# Altium footprint library Balancer.PcbLib: 11 footprints
Each footprint in its own frame and in the unit in brackets; x right, y up, seen from the top. Pads: shape width x height; smd on the part's side, far side on the other; paste and mask are expansions set on the pad; w line width, h text height; cw(c..) or ccw(c..) is an arc to the next point about the centre after c.
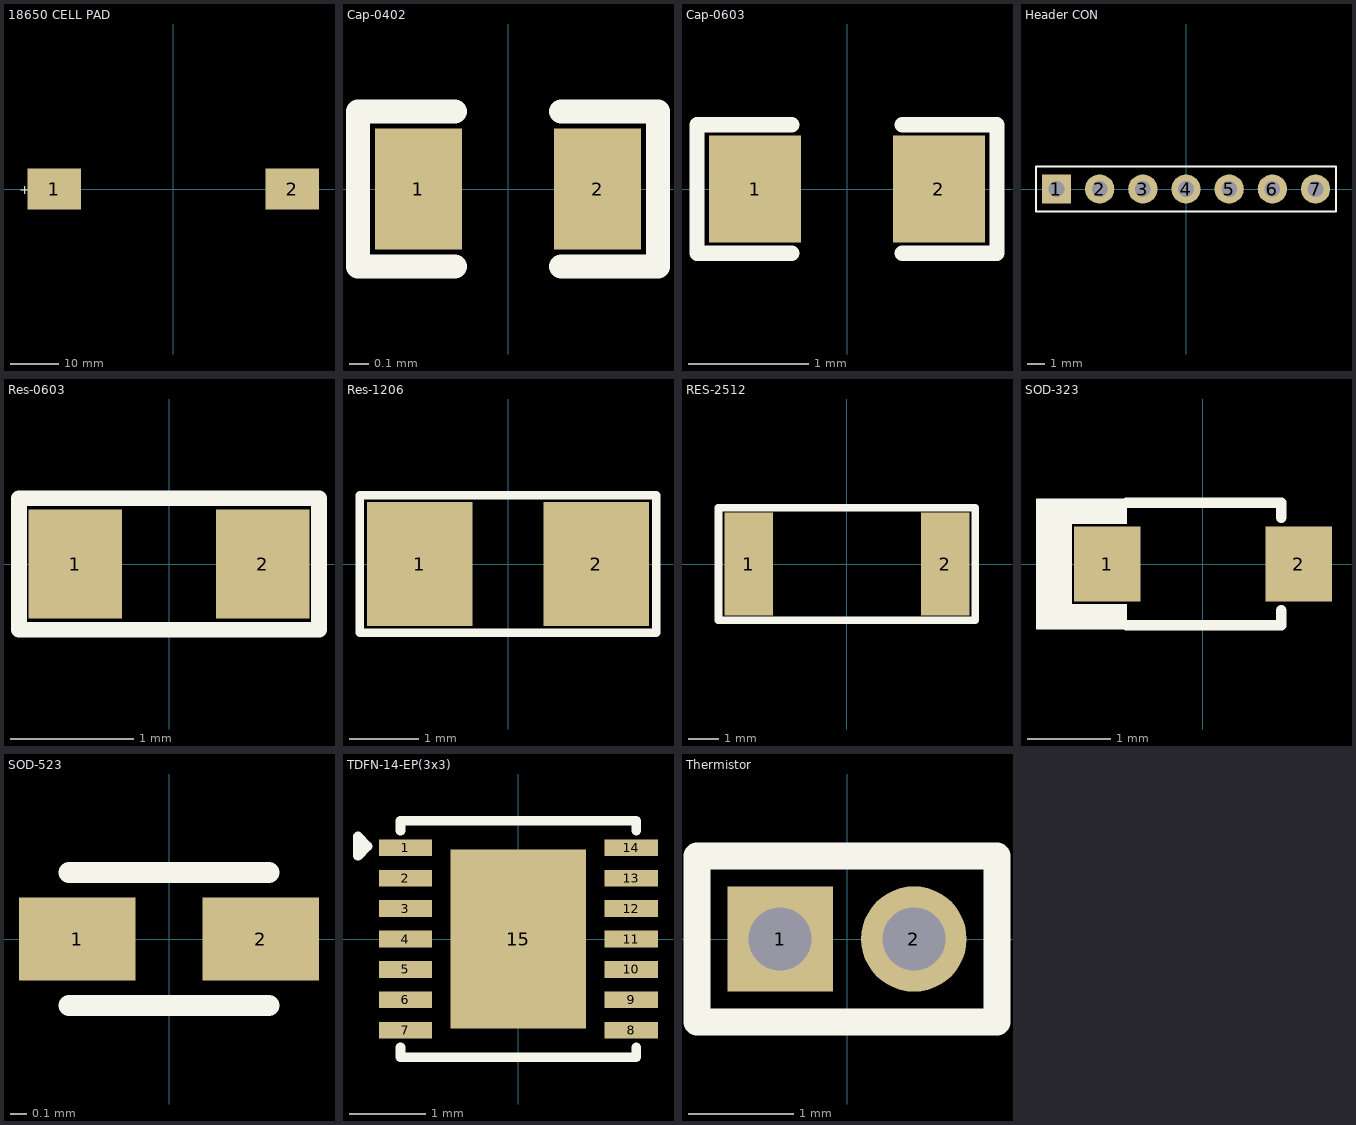
[diagram p0: the footprints below, top view; thin cyan lines are the x and y axes]

## 18650 CELL PAD [mm]
pads (2):
  rect 11x8.5 smd: 1(-24.5,0) 2(24.5,0)
Top Overlay:
  text "+" at -31.714,-1.07 h2

## Cap-0402 [mil]
pads (2):
  rect 18x25 smd mask+2.36: 1(-18.5,0) 2(18.5,0)
Top Overlay:
  lines w5: -11,-16 -31,-16 -31,16 -11,16 ; 11,-16 31,-16 31,16 11,16
3D body "User Library-Capacitor 0402.step": height 18.5, standoff -1.18, extent -19.68,-9.84 19.7,9.85

## Cap-0603 [mil]
pads (2):
  rect 30x35 smd mask+2.36: 1(-30,0) 2(30,0)
Top Overlay:
  lines w5: -18,-21 -49,-21 -49,21 -18,21 ; 18,-21 49,-21 49,21 18,21
3D body "User Library-CAPC1608X09.step": height 34.25, standoff -1.18, extent -31.51,-15.75 31.49,15.74

## Header CON [mm]
pads (7):
  rect 1.7x1.7 hole 0.9: 1(-7.5,0)
  round 1.7 hole 0.9: 2(-5,0) 3(-2.5,0) 4(0,0) 5(2.5,0) 6(5,0) 7(7.5,0)
Top Overlay:
  lines w0.127: -8.687,-1.295 8.687,-1.295 8.687,1.295 -8.687,1.295 -8.687,-1.295

## Res-0603 [mil]
pads (2):
  rect 30x35 smd: 1(-30,0) 2(30,0)
Top Overlay:
  lines w5: -48,-21 48,-21 48,21 -48,21 -48,-21
3D body "User Library-RESC1608X05N.step": height 17.76, standoff 0, extent -30.51,-16.73 30.51,16.73

## Res-1206 [mil]
pads (2):
  rect 60x70 smd: 1(-50,0) 2(50,0)
Top Overlay:
  lines w5: -84,-39 84,-39 84,39 -84,39 -84,-39
3D body "User Library-CR3216-1206.step": height 23.62, standoff 0, extent -62.99,-31.5 62.99,31.5

## RES-2512 [mm]
pads (2):
  rect 1.6x3.4 smd: 1(-3.25,0) 2(3.25,0)
Top Overlay:
  lines w0.254: -4.242,-1.854 4.237,-1.854 4.237,1.854 -4.242,1.854 -4.242,-1.854
3D body "CircuitWorks-RESISTOR 2512.step": height 0.58, standoff -0.03, extent -3.175,-1.63 3.175,1.63

## SOD-323 [mm]
pads (2):
  rect 0.8x0.9 smd mask+0.055: 1(-1.15,0) 2(1.15,0)
Top Overlay:
  rectangle: -2.007,0.483 -0.914,0.787
  rectangle: -2.007,-0.787 -0.914,-0.483
  rectangle: -2.007,-0.508 -1.575,0.508
  lines w0.127: -0.914,-0.737 0.94,-0.737 0.94,-0.559 ; -0.914,0.737 0.94,0.737 0.94,0.559
3D body "User Library-SOD323-1.step": height 1.1, standoff 0, extent -1.3,-0.675 1.3,0.675

## SOD-523 [mm]
pads (2):
  rect 0.7x0.5 smd: 1(-0.55,0) 2(0.55,0)
Top Overlay:
  lines w0.127: -0.6,-0.4 0.6,-0.4 ; -0.6,0.4 0.6,0.4
3D body "rb520s-40te61.stp": height 0.59, standoff -0.01, extent -0.8,-0.4 0.8,0.4

## TDFN-14-EP(3x3) [mm]
pads (15):
  rect 0.7x0.22 smd: 1(-1.485,1.2) 2(-1.485,0.8) 3(-1.485,0.4) 4(-1.485,0) 5(-1.485,-0.4) 6(-1.485,-0.8) 7(-1.485,-1.2) 8(1.485,-1.2) 9(1.485,-0.8) 10(1.485,-0.4) 11(1.485,0) 12(1.485,0.4) 13(1.485,0.8) 14(1.485,1.2)
  rect 1.78x2.35 smd paste-2: 15(0,0)
Top Overlay:
  lines w0.127: -1.55,-1.554 1.55,-1.554 ; -1.55,-1.543 -1.55,-1.423 ; -1.55,1.423 -1.55,1.543 ; -1.55,1.554 1.55,1.554 ; 1.55,-1.543 1.55,-1.423 ; 1.55,1.423 1.55,1.543 ; -2.108,1.092 -1.981,1.219 -2.108,1.346 -2.108,1.092
3D body "MAX38888ATD+T.STEP": height 0.77, standoff -0.03, extent -1.5,-1.5 1.5,1.5

## Thermistor [mm]
pads (2):
  rect 1x1 hole 0.6: 1(-0.635,0)
  round 1 hole 0.6: 2(0.635,0)
Top Overlay:
  lines w0.254: -1.422,-0.787 1.422,-0.787 1.422,0.787 -1.422,0.787 -1.422,-0.787